# Altium footprint library RCW_PcbLib.PcbLib: 61 footprints (part 1 of 4)
Each footprint in its own frame and in the unit in brackets; x right, y up, seen from the top. Pads: shape width x height; smd on the part's side, far side on the other; paste and mask are expansions set on the pad; w line width, h text height; cw(c..) or ccw(c..) is an arc to the next point about the centre after c.
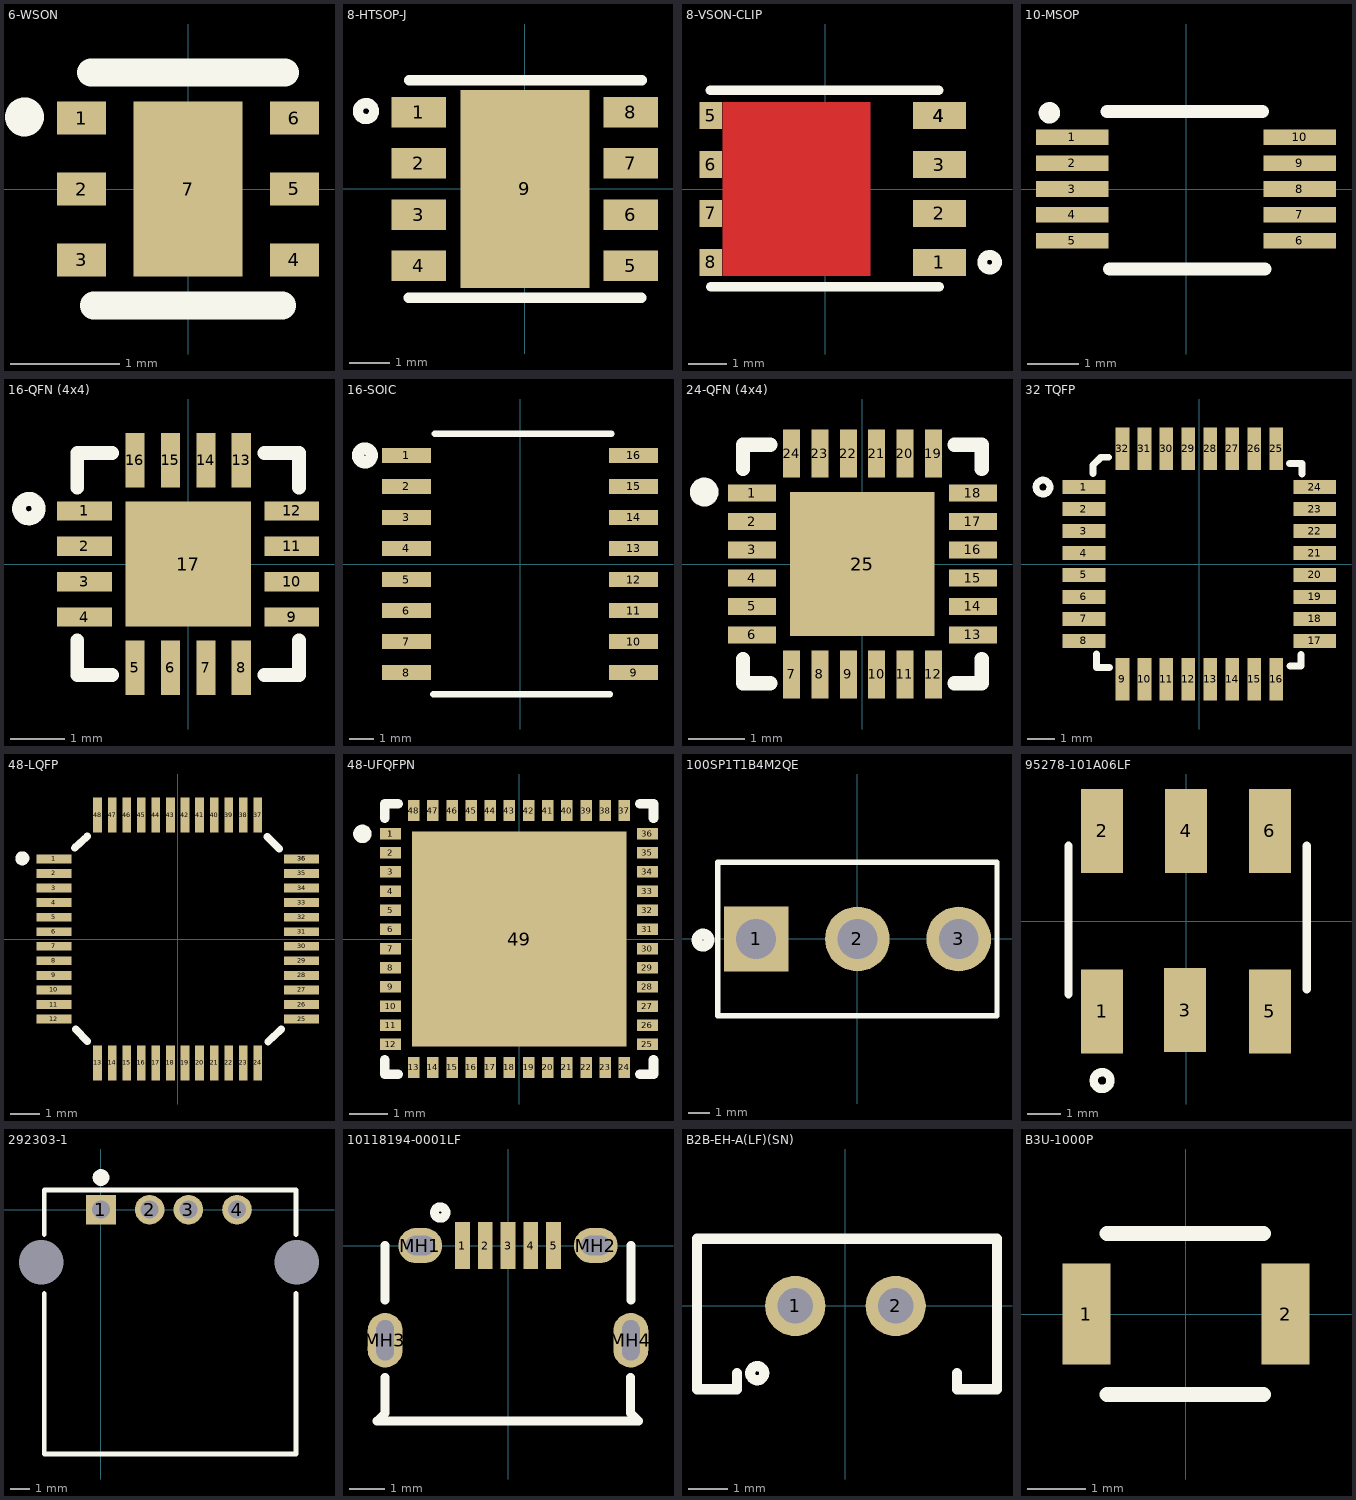
[diagram p0: the footprints below, top view; thin cyan lines are the x and y axes]

## 6-WSON [mm] "Linear Voltage Regulator IC  1 Output  1A"
pads (7):
  rect 0.45x0.3 smd: 1(-0.975,0.65) 2(-0.975,0) 3(-0.975,-0.65) 4(0.975,-0.65) 5(0.975,0) 6(0.975,0.65)
  rect 1x1.6 smd: 7(0,0)
Top Overlay:
  circle w0.254: c-1.499,0.66 r0.051
  lines w0.254: -0.889,1.067 0.889,1.067 ; -0.864,-1.067 0.864,-1.067
3D body "User Library-wson6-drv.STEP": height 0.8, standoff 0, extent -1.01,-1 1.01,1

## 8-HTSOP-J [mm] "IC REG LINEAR 5V 1A"
pads (9):
  rect 1.35x0.75 smd: 1(-2.625,1.905) 2(-2.625,0.635) 3(-2.625,-0.635) 4(-2.625,-1.905) 5(2.625,-1.905) 6(2.625,-0.635) 7(2.625,0.635) 8(2.625,1.905)
  rect 3.2x4.9 smd: 9(0,0)
Top Overlay:
  circle w0.254: c-3.937,1.93 r0.198
  lines w0.254: -2.883,-2.692 2.883,-2.692 ; -2.87,2.692 2.896,2.692
3D body "HTSOP-J8_ROM.step": height 0.99, standoff 0, extent -2.997,-2.629 2.997,2.629

## 8-VSON-CLIP [mm] "MOSFET N-CH 60V 100A 8VSON"
pads (11):
  rect 1.372x0.71 smd: 1(2.966,-1.905) 2(2.966,-0.635) 3(2.966,0.635) 4(2.966,1.905) 4(2.966,1.905) 4(2.966,1.905) 4(2.966,1.905)
  rect 0.59x0.71 smd: 5(-2.965,1.905) 6(-2.965,0.635) 7(-2.965,-0.635) 8(-2.965,-1.905)
Top Layer:
  rectangle: -2.666,-2.262 1.182,2.261
Top Overlay:
  circle w0.254: c4.268,-1.898 r0.191
  lines w0.254: -2.968,2.561 2.943,2.561 ; -2.956,-2.535 2.956,-2.535
3D body "CSD18532Q5B--3DModel-STEP-346837.STEP": height 1.05, standoff 0, extent -3,-2.5 3,2.5

## 10-MSOP [mm] "IC USB SWITCH 2X2 10MSOP"
pads (10):
  rect 1.4x0.3 smd: 1(-2.2,1) 2(-2.2,0.5) 3(-2.2,0) 4(-2.2,-0.5) 5(-2.2,-1) 6(2.2,-1) 7(2.2,-0.5) 8(2.2,0) 9(2.2,0.5) 10(2.2,1)
Top Overlay:
  circle w0.254: c-2.642,1.473 r0.08
  lines w0.254: -1.524,1.499 1.473,1.499 ; -1.473,-1.549 1.524,-1.549
3D body "User Library-MSOP-10-2.STEP": height 1.25, standoff 0, extent -2.45,-1.5 2.45,1.5

## 16-QFN (4x4) [mm] "IC BATT CHRG LI-ION"
pads (17):
  rect 1x0.35 smd: 1(-1.9,0.975) 2(-1.9,0.325) 3(-1.9,-0.325) 4(-1.9,-0.975) 9(1.9,-0.975) 10(1.9,-0.325) 11(1.9,0.325) 12(1.9,0.975)
  rect 0.35x1 smd: 5(-0.975,-1.9) 6(-0.325,-1.9) 7(0.325,-1.9) 8(0.975,-1.9) 13(0.975,1.9) 14(0.325,1.9) 15(-0.325,1.9) 16(-0.975,1.9)
  rect 2.3x2.3 smd: 17(0,0)
Top Overlay:
  circle w0.254: c-2.921,1.016 r0.18
  lines w0.254: -2.032,-1.397 -2.032,-2.032 -1.397,-2.032 ; -2.032,1.397 -2.032,2.032 -1.397,2.032 ; 1.397,-2.032 2.032,-2.032 2.032,-1.397 ; 1.397,2.032 2.032,2.032 2.032,1.397
3D body "User Library-qfn16-4x4.STEP": height 0.92, standoff 0, extent -2,-2 2,2

## 16-SOIC [mm] "IC BATTERY CHARGER CTRLR 16-SOIC"
pads (16):
  rect 2x0.6 smd: 1(-4.65,4.445) 2(-4.65,3.175) 3(-4.65,1.905) 4(-4.65,0.635) 5(-4.65,-0.635) 6(-4.65,-1.905) 7(-4.65,-3.175) 8(-4.65,-4.445) 9(4.65,-4.445) 10(4.65,-3.175) 11(4.65,-1.905) 12(4.65,-0.635) 13(4.65,0.635) 14(4.65,1.905) 15(4.65,3.175) 16(4.65,4.445)
Top Overlay:
  circle w0.5: c-6.35,4.445 r0.284
  lines w0.254: -3.556,-5.334 3.683,-5.334 ; -3.492,5.334 3.746,5.334
3D body "DW16_TEX.step": height 2.64, standoff 0, extent -5.321,-5.245 5.321,5.245

## 24-QFN (4x4) [mm]
pads (25):
  rect 0.85x0.3 smd: 1(-1.95,1.25) 2(-1.95,0.75) 3(-1.95,0.25) 4(-1.95,-0.25) 5(-1.95,-0.75) 6(-1.95,-1.25) 13(1.95,-1.25) 14(1.95,-0.75) 15(1.95,-0.25) 16(1.95,0.25) 17(1.95,0.75) 18(1.95,1.25)
  rect 0.3x0.85 smd: 7(-1.25,-1.95) 8(-0.75,-1.95) 9(-0.25,-1.95) 10(0.25,-1.95) 11(0.75,-1.95) 12(1.25,-1.95) 19(1.25,1.95) 20(0.75,1.95) 21(0.25,1.95) 22(-0.25,1.95) 23(-0.75,1.95) 24(-1.25,1.95)
  rect 2.55x2.55 smd: 25(0,0)
Top Overlay:
  circle w0.254: c-2.794,1.27 r0.127
  lines w0.254: -2.108,-1.676 -2.108,-2.108 -1.626,-2.108 ; -2.108,1.676 -2.108,2.108 -1.626,2.108 ; 1.626,-2.108 2.108,-2.108 2.108,-1.676 ; 1.626,2.108 2.108,2.108 2.108,1.676
3D body "QFN24(4X4).STEP": height 0.9, standoff 0, extent -2.01,-2.01 2.01,2.01

## 32 TQFP [mm] "32-Leads, Body 7.00x7.00mm, Pitch 0.80mm, TQFP"
height 1.2
pads (32):
  rect 1.55x0.5 smd: 1(-4.2,2.8) 2(-4.2,2) 3(-4.2,1.2) 4(-4.2,0.4) 5(-4.2,-0.4) 6(-4.2,-1.2) 7(-4.2,-2) 8(-4.2,-2.8) 17(4.2,-2.8) 18(4.2,-2) 19(4.2,-1.2) 20(4.2,-0.4) 21(4.2,0.4) 22(4.2,1.2) 23(4.2,2) 24(4.2,2.8)
  rect 0.5x1.55 smd: 9(-2.8,-4.2) 10(-2,-4.2) 11(-1.2,-4.2) 12(-0.4,-4.2) 13(0.4,-4.2) 14(1.2,-4.2) 15(2,-4.2) 16(2.8,-4.2) 25(2.8,4.2) 26(2,4.2) 27(1.2,4.2) 28(0.4,4.2) 29(-0.4,4.2) 30(-1.2,4.2) 31(-2,4.2) 32(-2.8,4.2)
Top Overlay:
  circle w0.25: c-5.692,2.8 r0.254
  lines w0.254: -3.871,3.302 -3.871,3.597 -3.581,3.886 -3.302,3.886 ; -3.736,-3.277 -3.736,-3.759 -3.277,-3.759 ; 3.277,3.658 3.734,3.658 3.734,3.277 ; 3.302,-3.708 3.708,-3.708 3.708,-3.302
3D body "32A.step": height 1.2, standoff 0, extent -4.623,-4.623 4.623,4.623

## 48-LQFP [mm] "IC MCU 32BIT 256KB FLASH 48LQFP"
pads (49):
  rect 1.2x0.3 smd: 1(-4.25,2.75) 2(-4.25,2.25) 3(-4.25,1.75) 4(-4.25,1.25) 5(-4.25,0.75) 6(-4.25,0.25) 7(-4.25,-0.25) 8(-4.25,-0.75) 9(-4.25,-1.25) 10(-4.25,-1.75) 11(-4.25,-2.25) 12(-4.25,-2.75) 25(4.25,-2.75) 26(4.25,-2.25) 27(4.25,-1.75) 28(4.25,-1.25) 29(4.25,-0.75) 30(4.25,-0.25) 31(4.25,0.25) 32(4.25,0.75) 33(4.25,1.25) 34(4.25,1.75) 35(4.25,2.25) 36(4.25,2.75) 36(4.25,2.75)
  rect 0.3x1.2 smd: 13(-2.75,-4.25) 14(-2.25,-4.25) 15(-1.75,-4.25) 16(-1.25,-4.25) 17(-0.75,-4.25) 18(-0.25,-4.25) 19(0.25,-4.25) 20(0.75,-4.25) 21(1.25,-4.25) 22(1.75,-4.25) 23(2.25,-4.25) 24(2.75,-4.25) 37(2.75,4.25) 38(2.25,4.25) 39(1.75,4.25) 40(1.25,4.25) 41(0.75,4.25) 42(0.25,4.25) 43(-0.25,4.25) 44(-0.75,4.25) 45(-1.25,4.25) 46(-1.75,4.25) 47(-2.25,4.25) 48(-2.75,4.25)
Top Overlay:
  circle w0.254: c-5.334,2.769 r0.114
  lines w0.254: -3.531,3.124 -3.099,3.531 ; -3.505,-3.099 -3.099,-3.505 ; 3.073,3.505 3.48,3.099 ; 3.099,-3.531 3.556,-3.099
3D body "User Library-LQFP48.STEP": height 1.5, standoff 0, extent -4.5,-4.5 4.5,4.5

## 48-UFQFPN [mm] "IC MCU 32BIT 256KB FLASH 48QFPN"
pads (50):
  rect 0.55x0.3 smd: 1(-3.35,2.75) 1(-3.35,2.75) 2(-3.35,2.25) 3(-3.35,1.75) 4(-3.35,1.25) 5(-3.35,0.75) 6(-3.35,0.25) 7(-3.35,-0.25) 8(-3.35,-0.75) 9(-3.35,-1.25) 10(-3.35,-1.75) 11(-3.35,-2.25) 12(-3.35,-2.75) 25(3.35,-2.75) 26(3.35,-2.25) 27(3.35,-1.75) 28(3.35,-1.25) 29(3.35,-0.75) 30(3.35,-0.25) 31(3.35,0.25) 32(3.35,0.75) 33(3.35,1.25) 34(3.35,1.75) 35(3.35,2.25) 36(3.35,2.75)
  rect 0.3x0.55 smd: 13(-2.75,-3.35) 14(-2.25,-3.35) 15(-1.75,-3.35) 16(-1.25,-3.35) 17(-0.75,-3.35) 18(-0.25,-3.35) 19(0.25,-3.35) 20(0.75,-3.35) 21(1.25,-3.35) 22(1.75,-3.35) 23(2.25,-3.35) 24(2.75,-3.35) 37(2.75,3.35) 38(2.25,3.35) 39(1.75,3.35) 40(1.25,3.35) 41(0.75,3.35) 42(0.25,3.35) 43(-0.25,3.35) 44(-0.75,3.35) 45(-1.25,3.35) 46(-1.75,3.35) 47(-2.25,3.35) 48(-2.75,3.35)
  rect 5.6x5.6 smd: 49(0,0)
Top Overlay:
  circle w0.254: c-4.089,2.743 r0.114
  lines w0.254: -3.505,-3.15 -3.505,-3.531 -3.15,-3.531 ; -3.505,3.15 -3.505,3.531 -3.15,3.531 ; 3.15,-3.531 3.505,-3.531 3.505,-3.15 ; 3.15,3.531 3.505,3.531 3.505,3.15
3D body "User Library-UFQFPN48.STEP": height 0.55, standoff 0, extent -3.5,-3.5 3.5,3.5

## 100SP1T1B4M2QE [mm] "SWITCH TOGGLE SPDT 5A 120V"
pads (3):
  rect 3x3 hole 1.85: 1(-4.7,0)
  round 3 hole 1.85: 2(0,0) 3(4.7,0)
Top Overlay:
  circle w0.5: c-7.163,-0.051 r0.279
  lines w0.254: -6.477,3.531 -6.477,-3.556 6.477,-3.556 6.477,3.556 -6.477,3.556
3D body "100SPxT1B4M2xE.stp": height 29.79, standoff -4.99, extent -6.35,-3.43 6.35,3.43

## 95278-101A06LF [mm] "CONN HEADER SMD 6POS 2.54MM"
pads (6):
  rect 1.27x2.54 smd: 1(-2.54,-2.73) 2(-2.54,2.73) 3(-0.025,-2.692) 4(0,2.73) 5(2.54,-2.73) 6(2.54,2.73)
Top Overlay:
  circle w0.254: c-2.54,-4.826 r0.254
  lines w0.254: -3.556,-2.21 -3.556,2.286 ; 3.658,-2.057 3.658,2.286
3D body "95278-101A06LF--3DModel-STEP-56544.STEP": height 9.72, standoff 0.03, extent -3.585,-3.632 3.635,3.668

## 292303-1 [mm] "USB-A (USB TYPE-A) USB 2.0 Receptacle Connector 4 Position Through Hole, Right Angle"
pads (6):
  rect 1.524x1.524 hole 0.92: 1(0,0)
  round 1.524 hole 0.92: 2(2.5,0) 3(4.5,0) 4(7,0)
  round 0 hole 2.3 unplated: MH1(-3.07,-2.71) MH2(10.07,-2.71)
Top Overlay:
  circle w0.5: c0,1.651 r0.18
  lines w0.254: -2.921,-4.318 -2.921,-12.573 10.033,-12.573 10.033,-4.318 ; -2.921,-1.27 -2.921,1.016 10.033,1.016 10.033,-1.27
3D body "292303-1--3DModel-STEP-56544.STEP": height 7.71, standoff -3.77, extent -4.444,-13.022 11.556,0.978

## 10118194-0001LF [mm]
pads (9):
  rect 0.42x1.35 smd: 1(-1.3,0) 2(-0.65,0) 3(0,0) 4(0.65,0) 5(1.3,0)
  oval 1.25x1 hole 0.55 slot 0.85 at 0 deg: MH1(-2.5,0) MH2(2.5,0)
  oval 1x1.55 hole 0.5 slot 1.15 at 90 deg: MH3(-3.5,-2.7) MH4(3.5,-2.7)
Top Overlay:
  circle w0.254: c-1.93,0.94 r0.163
  lines w0.254: -3.505,-3.765 -3.505,-4.765 -3.505,-4.775 -3.734,-5.004 3.723,-5.004 3.495,-4.775 ; -3.505,-1.549 -3.505,0 ; 3.495,-4.765 3.495,-3.765 ; 3.505,-1.549 3.505,0
3D body "10118194c.stp": height 2.72, standoff -0.55, extent -4.025,-5.385 4.025,0.195
3D body: height 0.25, standoff 0, extent -7.671,-3.81 -7.671,-3.81

## B2B-EH-A(LF)(SN) [mil]
pads (2):
  round 60 hole 35.43: 1(-50,0) 2(50,0)
Top Overlay:
  circle w10: c-88,-67 r7.07
  lines w10: -108,-67 -108,-83 -148,-83 -148,67 151,67 151,-83 111,-83 111,-67
3D body "User Library-B2B-EH-A.step": height 244.09, standoff -118.11, extent -147.64,-85.61 147.64,64

## B3U-1000P [mm] "SWITCH TACTILE SPST-NO 0.05A 12V"
pads (2):
  rect 0.82x1.72 smd: 1(-1.7,0) 2(1.7,0)
Top Overlay:
  lines w0.254: -1.346,-1.372 0,-1.372 1.321,-1.372 ; -1.346,1.372 0,1.372 1.321,1.372
3D body "User Library-OMRON B3U1000P.step": height 1.6, standoff 0, extent -2,-1.263 2,1.237